# Altium footprint library Fixture-Lib.PcbLib: 2 footprints
Each footprint in its own frame and in the unit in brackets; x right, y up, seen from the top. Pads: shape width x height; smd on the part's side, far side on the other; paste and mask are expansions set on the pad; w line width, h text height; cw(c..) or ccw(c..) is an arc to the next point about the centre after c.
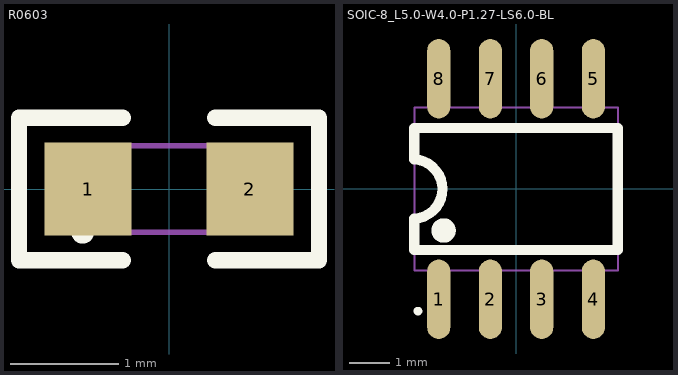
[diagram p0: the footprints below, top view; thin cyan lines are the x and y axes]

## R0603 [mm] "EasyEDA/LCSC"
pads (2):
  rect 0.806x0.864 smd: 1(-0.75,0) 2(0.75,0)
Top Overlay:
  circle w0.152: c-0.8,-0.4 r0.03
  lines w0.152: -0.43,-0.66 -1.39,-0.66 -1.39,0.66 -0.43,0.66 ; 0.43,-0.66 1.39,-0.66 1.39,0.66 0.43,0.66
Courtyard Top:
  lines w0.05: -0.8,-0.4 -0.8,0.4 0.8,0.4 0.8,-0.4 -0.8,-0.4

## SOIC-8_L5.0-W4.0-P1.27-LS6.0-BL [mm] "EasyEDA/LCSC"
pads (8):
  oval 0.568x1.95 smd: 1(-1.9,-2.71) 2(-0.63,-2.71) 3(0.63,-2.71) 4(1.9,-2.71) 5(1.9,2.71) 6(0.63,2.71) 7(-0.63,2.71) 8(-1.9,2.71)
Top Overlay:
  circle w0.152: c-2.41,-3 r0.03
  circle w0.3: c-1.78,-1.02 r0.15
  lines w0.25: -2.5,-0.73 -2.5,-1.5 2.5,-1.5 2.5,1.5 -2.5,1.5 -2.5,0.73 cw(c-2.54,0) -2.495,-0.73
Courtyard Top:
  lines w0.05: -2.5,-2 -2.5,2 2.5,2 2.5,-2 -2.5,-2